# Altium footprint library Footprint.PcbLib: 154 footprints (part 10 of 10)
Each footprint in its own frame and in the unit in brackets; x right, y up, seen from the top. Pads: shape width x height; smd on the part's side, far side on the other; paste and mask are expansions set on the pad; w line width, h text height; cw(c..) or ccw(c..) is an arc to the next point about the centre after c.
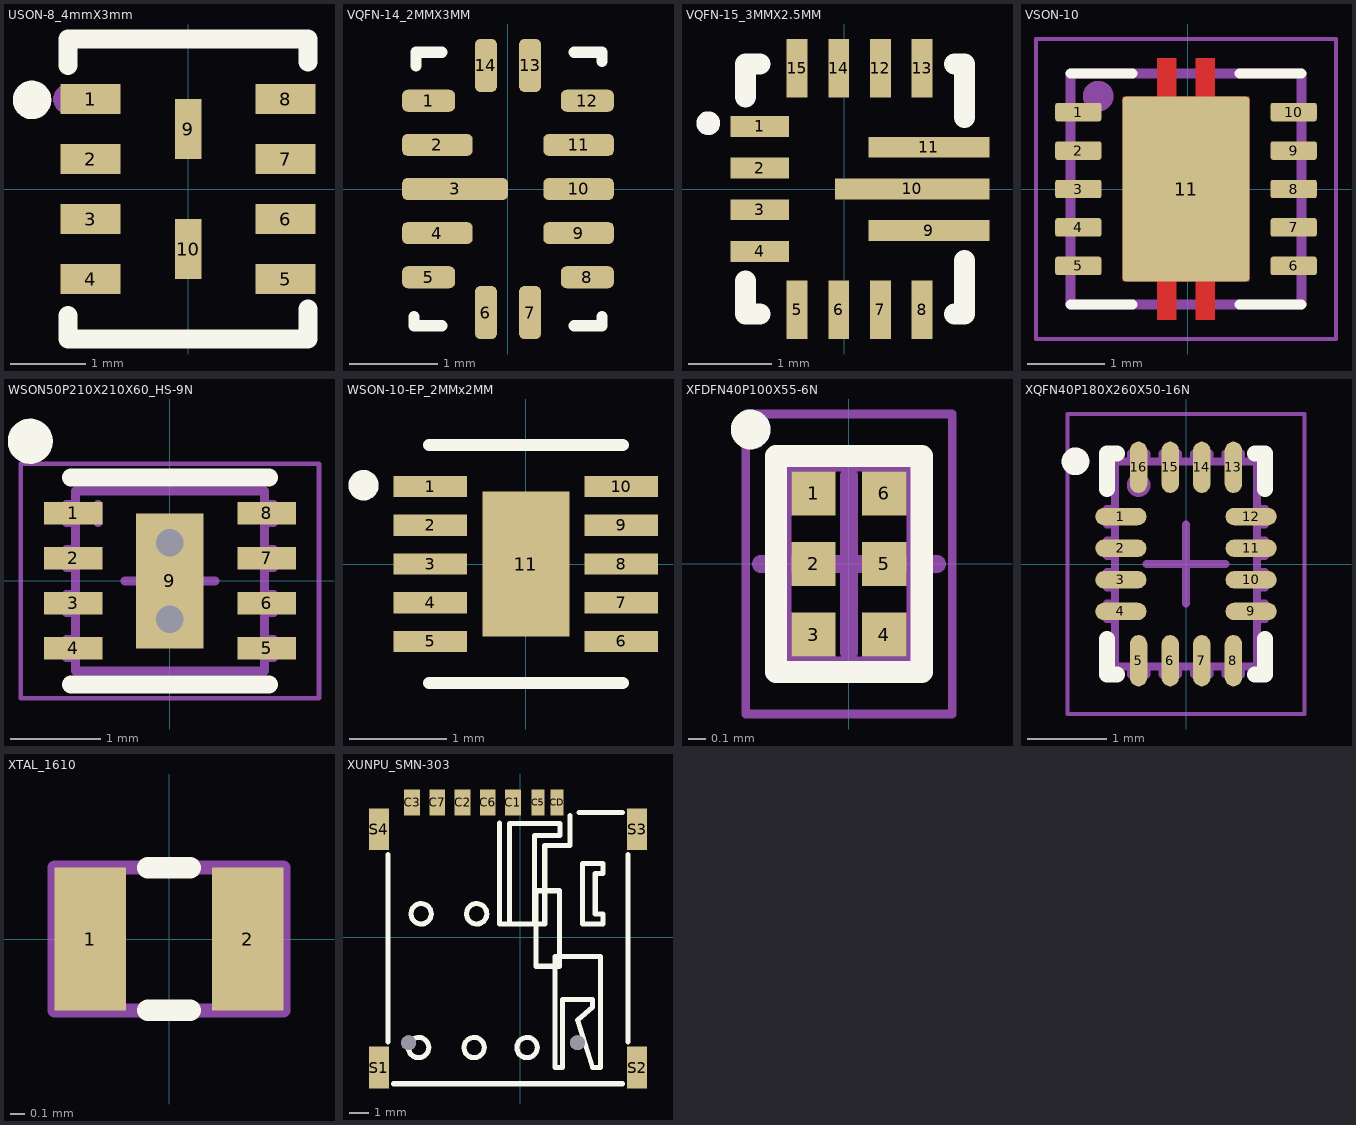
[diagram p9: the footprints below, top view; thin cyan lines are the x and y axes]

## USON-8_4mmX3mm [mm]
pads (10):
  rect 0.8x0.4 smd paste+0 mask+0.051: 1(-1.3,1.2) 2(-1.3,0.4) 3(-1.3,-0.4) 4(-1.3,-1.2) 5(1.3,-1.2) 6(1.3,-0.4) 7(1.3,0.4) 8(1.3,1.2)
  rect 0.35x0.8 smd paste+0 mask+0.051: 9(0,0.802) 10(0,-0.798)
Top Overlay:
  circle w0.254: c-2.08,1.19 r0.13
  lines w0.254: -1.6,-1.681 -1.6,-1.997 1.6,-1.997 1.6,-1.598 ; -1.6,1.646 -1.6,2.002 1.6,2.001 1.6,1.697
Mechanical 15:
  circle w0.2: c-1.6,1.2 r0.1
3D body "User Library-USON-8L.STEP": height 0.55, standoff 0, extent -1.5,-1.975 1.5,2.025

## VQFN-14_2MMX3MM [mm]
pads (14):
  rrect50% 0.6x0.25 smd: 1(-0.9,1) 5(-0.9,-1) 8(0.9,-1) 12(0.9,1)
  rrect50% 0.8x0.25 smd: 2(-0.8,0.5) 4(-0.8,-0.5) 9(0.8,-0.5) 10(0.8,0) 11(0.8,0.5)
  rrect50% 1.2x0.25 smd: 3(-0.6,0)
  rrect50% 0.25x0.6 smd: 6(-0.25,-1.4) 7(0.25,-1.4) 13(0.25,1.4) 14(-0.25,1.4)
Top Overlay:
  lines w0.127: -1.067,-1.448 -1.067,-1.55 -0.75,-1.55 ; -1.041,1.396 -1.041,1.55 -0.75,1.55 ; 0.75,-1.55 1.05,-1.55 ; 0.75,1.55 1.05,1.55 ; 1.067,-1.55 1.067,-1.448 ; 1.067,1.447 1.067,1.549
3D body "RPG0014A.stp": height 1, standoff 0, extent -1,-1.5 1,1.5

## VQFN-15_3MMX2.5MM [mm]
pads (15):
  rect 0.7x0.25 smd paste+0 mask+0.051: 1(-1.016,0.75) 2(-1.016,0.25) 3(-1.016,-0.25) 4(-1.016,-0.75)
  rect 0.25x0.7 smd paste+0 mask+0.051: 5(-0.566,-1.45) 6(-0.066,-1.45) 7(0.434,-1.45) 8(0.934,-1.45) 12(0.434,1.45) 13(0.934,1.45) 14(-0.066,1.45) 15(-0.566,1.45)
  rect 1.45x0.25 smd paste+0 mask+0.051: 9(1.016,-0.5) 11(1.016,0.5)
  rect 1.85x0.25 smd paste+0 mask+0.051: 10(0.816,0)
Top Overlay:
  circle w0.2: c-1.634,0.79 r0.043
  lines w0.254: -1.184,-1.106 -1.184,-1.5 -1.015,-1.5 ; -1.184,1.106 -1.184,1.5 -1.015,1.5 ; 1.324,-1.5 1.443,-1.5 1.443,-0.856 ; 1.324,1.5 1.443,1.5 1.443,0.856
3D body "TPS63070RNMR.step": height 1, standoff 0, extent -1.25,-1.5 1.25,1.5

## VSON-10 [mm]
pads (11):
  rrect25% 0.6x0.24 smd mask+0: 1(-1.425,1) 2(-1.425,0.5) 3(-1.425,0) 4(-1.425,-0.5) 5(-1.425,-1) 6(1.375,-1) 7(1.375,-0.5) 8(1.375,0) 9(1.375,0.5) 10(1.375,1)
  rrect5% 1.65x2.4 smd paste-2 mask+0: 11(-0.025,0)
Top Layer:
  region: 0.35,1.2 0.8,1.2 0.8,-1.2 0.35,-1.2 0.35,-1.7 0.1,-1.7 0.1,-1.2 -0.15,-1.2 -0.15,-1.7 -0.4,-1.7 -0.4,-1.2 -0.85,-1.2 -0.85,1.2 -0.4,1.2 -0.4,1.7 -0.15,1.7 -0.15,1.2 0.1,1.2 0.1,1.7 0.35,1.7
Top Overlay:
  lines w0.127: -1.525,-1.5 -0.72,-1.5 ; -1.525,1.5 -0.72,1.5 ; 0.67,-1.5 1.475,-1.5 ; 0.67,1.5 1.475,1.5
Top Paste:
  region: 0.725,0.1 -0.775,0.1 -0.775,1.16 0.725,1.16
  region: 0.725,-1.16 -0.775,-1.16 -0.775,-0.1 0.725,-0.1
  region: 0.35,1.36 0.1,1.36 0.1,1.7 0.35,1.7
  region: -0.15,1.36 -0.4,1.36 -0.4,1.7 -0.15,1.7
  region: 0.35,-1.7 0.1,-1.7 0.1,-1.36 0.35,-1.36
  region: -0.15,-1.7 -0.4,-1.7 -0.4,-1.36 -0.15,-1.36
Top Solder:
  region: 0.42,1.27 0.87,1.27 0.87,-1.27 0.42,-1.27 0.42,-1.77 0.03,-1.77 0.03,-1.27 -0.08,-1.27 -0.08,-1.77 -0.47,-1.77 -0.47,-1.27 -0.92,-1.27 -0.92,1.27 -0.47,1.27 -0.47,1.77 -0.08,1.77 -0.08,1.27 0.03,1.27 0.03,1.77 0.42,1.77
  region: 1.745,0.81 1.005,0.81 1.005,1.19 1.745,1.19
  region: 1.745,0.31 1.005,0.31 1.005,0.69 1.745,0.69
  region: 1.745,-0.19 1.005,-0.19 1.005,0.19 1.745,0.19
  region: 1.745,-0.69 1.005,-0.69 1.005,-0.31 1.745,-0.31
  region: 1.745,-1.19 1.005,-1.19 1.005,-0.81 1.745,-0.81
  region: -1.055,-1.19 -1.795,-1.19 -1.795,-0.81 -1.055,-0.81
  region: -1.055,-0.69 -1.795,-0.69 -1.795,-0.31 -1.055,-0.31
  region: -1.055,-0.19 -1.795,-0.19 -1.795,0.19 -1.055,0.19
  region: -1.055,0.31 -1.795,0.31 -1.795,0.69 -1.055,0.69
  region: -1.055,0.81 -1.795,0.81 -1.795,1.19 -1.055,1.19
Top Component Outline:
  circle w0.2: c-1.166,1.206 r0.1
  lines w0.127: -1.525,-1.5 1.475,-1.5 1.475,1.5 -1.525,1.5 -1.525,-1.5
Mechanical 15:
  lines w0.05: -1.975,-1.95 -1.975,1.95 1.925,1.95 1.925,-1.95 -1.975,-1.95
3D body "TPS63001DRCR.STEP": height 1, standoff 0, extent -1.525,-1.5 1.475,1.5

## WSON50P210X210X60_HS-9N [mm]
pads (9):
  rect 0.65x0.25 smd: 1(-1.075,0.75) 2(-1.075,0.25) 3(-1.075,-0.25) 4(-1.075,-0.75) 5(1.075,-0.75) 6(1.075,-0.25) 7(1.075,0.25) 8(1.075,0.75)
  rect 0.75x1.5 smd: 9(0,0)
via 0,0.425 diameter 0.61 hole 0.305
via 0,-0.425 diameter 0.61 hole 0.305
Top Overlay:
  circle w0.25: c-1.55,1.55 r0.125
  lines w0.2: -1.1,-1.15 1.1,-1.15 ; -1.1,1.15 1.1,1.15
Mechanical 7:
  lines w0.1: -1.05,-0.85 -1.15,-0.85 -1.15,-0.65 -1.05,-0.65 ; -1.05,-0.35 -1.15,-0.35 -1.15,-0.15 -1.05,-0.15 ; -1.05,0.15 -1.15,0.15 -1.15,0.35 -1.05,0.35 ; -1.05,0.65 -1.15,0.65 -1.15,0.85 -1.05,0.85 ; -0.8,0.65 -0.8,0.85 ; 1.05,-0.85 1.15,-0.85 1.15,-0.65 1.05,-0.65 ; 1.05,-0.35 1.15,-0.35 1.15,-0.15 1.05,-0.15 ; 1.05,0.15 1.15,0.15 1.15,0.35 1.05,0.35 ; 1.05,0.65 1.15,0.65 1.15,0.85 1.05,0.85 ; -1.05,-1 -1.05,1 1.05,1 1.05,-1 -1.05,-1 ; -0.3,-0.59 -0.3,0.01 0.3,0.01 0.3,-0.59 -0.3,-0.59
  text ".Designator" at -0.5,0.3 h0.38
Mechanical 15:
  lines w0.05: -1.655,-1.3 -1.655,1.3 1.655,1.3 1.655,-1.3 -1.655,-1.3
  lines w0.1: -0.5,0 0.5,0 ; 0,-0.5 0,0.5
3D body "SON50P210X60_HS-9N.step": height 0.6, standoff 0, extent -1.101,-1.05 1.101,1.05

## WSON-10-EP_2MMx2MM [mm]
pads (11):
  rect 0.76x0.22 smd mask+0.04: 1(-0.985,0.8) 2(-0.985,0.4) 3(-0.985,0) 4(-0.985,-0.4) 5(-0.985,-0.8) 6(0.985,-0.8) 7(0.985,-0.4) 8(0.985,0) 9(0.985,0.4) 10(0.985,0.8)
  rect 0.9x1.5 smd paste-2 mask+0.04: 11(0,0)
Top Overlay:
  circle w0.2: c-1.676,0.813 r0.057
  lines w0.127: -1,-1.23 1,-1.23 ; -1,1.23 1,1.23
Top Paste:
  region: 0.285,-0.475 -0.285,-0.475 -0.285,0.475 0.285,0.475
3D body "BQ24040DSQR.step": height 0.8, standoff 0, extent -1,-1 1,1

## XFDFN40P100X55-6N [mm]
pads (6):
  rect 0.25x0.25 smd mask+0.05: 1(-0.2,0.4) 2(-0.2,0) 3(-0.2,-0.4) 4(0.2,-0.4) 5(0.2,0) 6(0.2,0.4)
Top Overlay:
  circle w0.125: c-0.557,0.762 r0.05
  lines w0.125: -0.413,-0.613 0.412,-0.613 0.412,0.612 -0.413,0.612 -0.413,-0.613
Mechanical 7:
  lines w0.1: -0.375,-0.575 -0.375,0.575 0.375,0.575 0.375,-0.575 -0.375,-0.575
  text ".Designator" at 0.15,-0.4 h0.3
Mechanical 15:
  lines w0.05: -0.585,-0.85 0.585,-0.85 0.585,0.85 -0.585,0.85 -0.585,-0.85
  lines w0.1: -0.5,0 0.5,0 ; 0,-0.5 0,0.5
3D body "PSON40P70X40-6N.step": height 0.4, standoff 0, extent -0.376,-0.575 0.376,0.575

## XQFN40P180X260X50-16N [mm]
pads (16):
  oval 0.65x0.22 smd paste-0.02 mask+0.04: 1(-0.825,0.6) 2(-0.825,0.2) 3(-0.825,-0.2) 4(-0.825,-0.6) 9(0.825,-0.6) 10(0.825,-0.2) 11(0.825,0.2) 12(0.825,0.6)
  oval 0.22x0.65 smd paste-0.02 mask+0.04: 5(-0.6,-1.225) 6(-0.2,-1.225) 7(0.2,-1.225) 8(0.6,-1.225) 13(0.6,1.225) 14(0.2,1.225) 15(-0.2,1.225) 16(-0.6,1.225)
Top Overlay:
  circle w0.25: c-1.4,1.3 r0.05
  lines w0.2: -1,-0.95 -1,-1.4 -0.875,-1.4 ; -1,0.95 -1,1.4 -0.875,1.4 ; 0.875,-1.4 1,-1.4 1,-0.95 ; 0.875,1.4 1,1.4 1,0.95
Mechanical 7:
  circle w0.1: c-0.6,1 r0.1
  lines w0.1: -0.9,-0.7 -1,-0.7 -1,-0.5 -0.9,-0.5 ; -0.9,-0.3 -1,-0.3 -1,-0.1 -0.9,-0.1 ; -0.9,0.1 -1,0.1 -1,0.3 -0.9,0.3 ; -0.9,0.5 -1,0.5 -1,0.7 -0.9,0.7 ; -0.7,-1.3 -0.7,-1.4 -0.5,-1.4 -0.5,-1.3 ; -0.7,1.3 -0.7,1.4 -0.5,1.4 -0.5,1.3 ; -0.3,-1.3 -0.3,-1.4 -0.1,-1.4 -0.1,-1.3 ; -0.3,1.3 -0.3,1.4 -0.1,1.4 -0.1,1.3 ; 0.1,-1.3 0.1,-1.4 0.3,-1.4 0.3,-1.3 ; 0.1,1.3 0.1,1.4 0.3,1.4 0.3,1.3 ; 0.5,-1.3 0.5,-1.4 0.7,-1.4 0.7,-1.3 ; 0.5,1.3 0.5,1.4 0.7,1.4 0.7,1.3 ; 0.9,-0.7 1,-0.7 1,-0.5 0.9,-0.5 ; 0.9,-0.3 1,-0.3 1,-0.1 0.9,-0.1 ; 0.9,0.1 1,0.1 1,0.3 0.9,0.3 ; 0.9,0.5 1,0.5 1,0.7 0.9,0.7 ; -0.9,-1.3 -0.9,1.3 0.9,1.3 0.9,-1.3 -0.9,-1.3
  text ".Designator" at -0.45,-0.2 h0.38
Mechanical 15:
  lines w0.05: -1.5,-1.9 -1.5,1.9 1.5,1.9 1.5,-1.9 -1.5,-1.9
  lines w0.1: -0.5,0 0.5,0 ; 0,-0.5 0,0.5
3D body "User Library-XQFN-16-1.step": height 0.55, standoff 0, extent -0.91,-1.31 0.91,1.31
3D body: height 0.55, standoff 0.4, extent -0.9,-0.35 0.9,0.35

## XTAL_1610 [mm]
pads (2):
  rect 0.5x1 smd: 1(-0.55,0) 2(0.55,0)
Top Overlay:
  lines w0.15: -0.15,-0.5 0.15,-0.5 ; -0.15,0.5 0.15,0.5
Mechanical 7:
  lines w0.1: -0.8,-0.5 -0.8,0.5 0.8,0.5 0.8,-0.5 -0.8,-0.5
  text ".Designator" at -0.7,-0.2 h0.38
3D body: height 0.5, standoff 0.45, extent -0.75,-0.45 0.75,0.45
3D body: height 0.45, standoff 0, extent -0.8,-0.5 0.8,0.5

## XUNPU_SMN-303 [mm]
pads (13):
  rect 0.8x1.3 smd paste+0 mask+0.051: C1(-0.37,6.774) C2(-2.91,6.774) C3(-5.45,6.774) C6(-1.64,6.774) C7(-4.18,6.774)
  rect 0.65x1.3 smd paste+0 mask+0.051: C5(0.9,6.774) CD(1.85,6.774)
  rect 1x2.1 smd paste+0 mask+0.051: S1(-7.12,-6.57) S2(5.88,-6.57) S3(5.88,5.43) S4(-7.12,5.43)
  round 0.75 hole 0.75 unplated paste-2539.97: ""(-5.62,-5.32) ""(2.88,-5.32)
Top Overlay:
  circle w0.254: c-4.992,1.17 r0.512
  circle w0.254: c-2.198,1.17 r0.512
  circle w0.254: c-5.119,-5.561 r0.512
  circle w0.254: c-2.325,-5.561 r0.512
  circle w0.254: c0.342,-5.561 r0.512
  lines w0.254: -6.662,-5.289 -6.662,4.149 ; -6.389,-7.384 5.149,-7.384 ; -1.055,5.74 -1.055,0.662 1.231,0.662 1.231,4.599 2.501,4.599 ; -0.547,0.662 -0.547,5.715 1.993,5.715 1.993,5.107 0.723,5.107 0.723,0.662 ; 2.949,6.266 5.149,6.266 ; 5.422,-5.289 5.422,4.149 ; 2.501,4.599 2.501,6.109 2.501,4.599 ; 0.78,-1.47 1.98,-1.47 1.98,2.33 0.78,2.33 0.78,-1.47 ; 1.739,-6.577 2.12,-6.577 2.12,-3.148 3.644,-3.148 3.644,-3.529 2.882,-4.164 3.644,-6.577 4.025,-6.577 4.025,-0.989 1.739,-0.989 1.739,-6.577 ; 3.136,0.662 3.136,3.71 4.152,3.71 4.152,3.202 3.771,3.202 3.771,1.17 4.152,1.17 4.152,0.662 3.136,0.662
Mechanical 15:
  circle w0.3: c-5.62,-5.32 r0.15
  circle w0.3: c2.88,-5.32 r0.15
3D body "SF72S006VBAR2500--3DModel-STEP-56544.STEP": height 1.2, standoff -0.06, extent -6.375,-7.353 4.825,6.997